# Altium schematic symbol library KLS7-TS5401.SchLib: 1 symbol
Pins are listed as number, name and electrical type; pins without a type are passive.

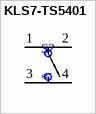
[diagram p0: symbol KLS7-TS5401]

## KLS7-TS5401
designator S?
footprint KLS7-TS5401 (Footprint not found)
pins: 1, 2, 3, 4